# Altium schematic symbol library PMP23468.SchLib: 24 symbols
Pins are listed as number, name and electrical type; pins without a type are passive.

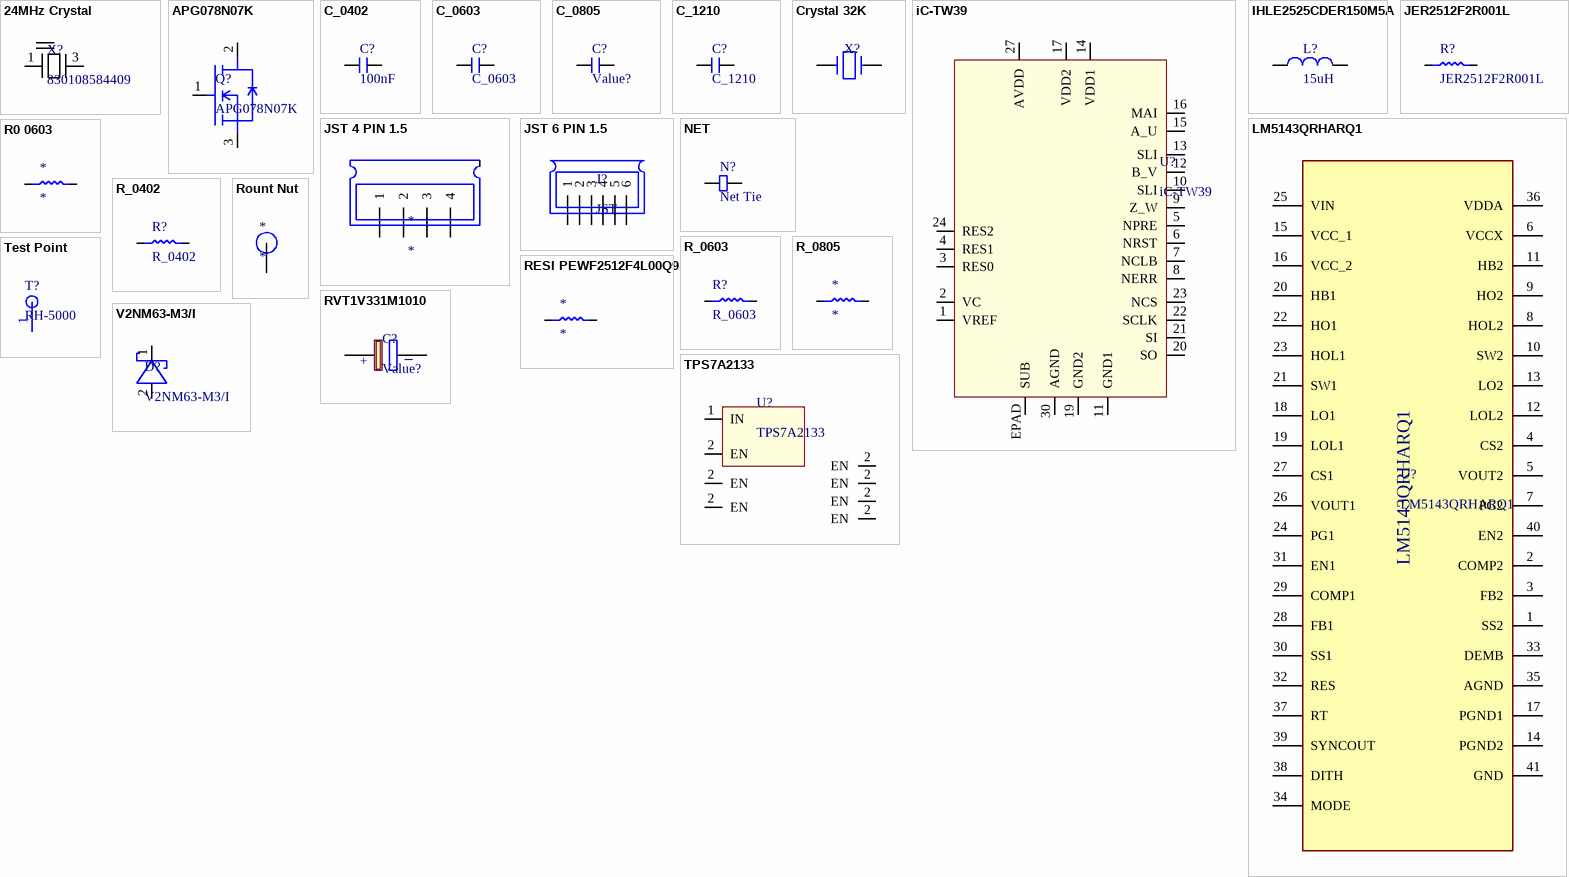
[diagram p0: symbols 24MHz Crystal to V2NM63-M3/I]

## 24MHz Crystal
designator X?, comment 830108584409
footprint 24MHz Crystal
pins: 1, 2, 3, 4

## APG078N07K
designator Q?
70V 80A 6.7mΩ@10V,30A 45W 3V@250uA 1PCSNChannel TO-252-2  MOSFETs ROHS; Manufacturer Part No: APG078N07K; JLCPCB Part No: C2995332
footprint APG078N07K (70V 80A 6.7mO@10V,30A 45W 3V@250uA 1PCSNChannel TO-252-2  MOSFETs ROHS)
pins: 1 G, 2 D, 3 S

## C_0402
designator C?, comment 100nF
footprint C_0402
pins: 1, 2

## C_0603
designator C?
footprint C_0603
pins: 1, 2

## C_0805
designator C?, comment Value?
Manufacturer Part No: *; JLCPCB Part No: *
footprint C_0805
pins: 1, 2

## C_1210
designator C?
footprint C_1210
pins: 1, 2

## Crystal 32K
designator X?
footprint Crystal 32k
pins: 1, 2

## iC-TW39
designator U?
footprint iC-TW39 (24-BIT MAGNETIC ON-AXIS ANGLE SENSOR)
pins: 1 VREF, 2 VC, 3 RES0, 4 RES1, 5 NPRE, 6 NRST, 7 NCLB, 8 NERR, 9 Z_W, 10 SLI, 11 GND1, 12 B_V, 13 SLI, 14 VDD1, 15 A_U, 16 MAI, 17 VDD2, 19 GND2, 20 SO, 21 SI, 22 SCLK, 23 NCS, 24 RES2, 27 AVDD, 30 AGND, EPAD SUB

## IHLE2525CDER150M5A
designator L?, comment 15uH
pins: 1, 2

## JER2512F2R001L
designator R?
RES 1mΩ ±1% 2W 2512; Manufacturer Part No: JIERR JER2512F2R001L; LCSC Part No: C49164682
footprint JER2512F2R001L
pins: 1, 2

## JST 4 PIN 1.5
designator *
footprint JST 4 PIN 1.5
pins: 1, 2, 3, 4

## JST 6 PIN 1.5
designator J?, comment JST
footprint JST 6 PIN 1.5
pins: 1, 2, 3, 4, 5, 6

## LM5143QRHARQ1
designator U?
JLCPCB Part No: C5219258; Manufacturer Part No: LM5143QRHARQ1
footprint LM5143QRHARQ1 (40A 600mV~55V 3.5V~65V VQFN(RHA)-40  DC-DC Converters ROHS)
pins: 1 SS2, 2 COMP2, 3 FB2, 4 CS2, 5 VOUT2, 6 VCCX, 7 PG2, 8 HOL2, 9 HO2, 10 SW2, 11 HB2, 12 LOL2, 13 LO2, 14 PGND2, 15 VCC_1, 16 VCC_2, 17 PGND1, 18 LO1, 19 LOL1, 20 HB1, 21 SW1, 22 HO1, 23 HOL1, 24 PG1, 25 VIN, 26 VOUT1, 27 CS1, 28 FB1, 29 COMP1, 30 SS1, 31 EN1, 32 RES, 33 DEMB, 34 MODE, 35 AGND, 36 VDDA, 37 RT, 38 DITH, 39 SYNCOUT, 40 EN2, 41 GND

## NET
designator N?, comment Net Tie  (net tie)
footprint Net
pins: 1, 2

## R0 0603
designator *
footprint R0 0603
pins: 1, 2

## R_0402
designator R?
footprint R_0402
pins: 1, 2

## R_0603
designator R?
footprint R_0603 (SMD Resistor 0603)
pins: 1, 2

## R_0805
designator *
footprint R_0805
pins: 1, 2

## RESI PEWF2512F4L00Q9
designator *
footprint RESI PEWF2512F4L00Q9 (3W 4mΩ Surface Mount Shunt ±50ppm/℃ ±1% 2512 Current Sense Resistors / Shunt Resistors ROHS)
pins: 1, 2

## Rount Nut
designator *
footprint Round Nut
pins: 1

## RVT1V331M1010
designator C?, comment Value?
Manufacturer Part No: *; JLCPCB Part No: *
footprint RVT1V331M1010
pins: 1, 2
text: _; +

## Test Point
designator T?, comment RH-5000
Manufacturer Part No: RH-5000; JLCPCB Part No: C5277086
footprint Test Point (RH-5000)
pins: 1

## TPS7A2133
designator U?
pins: 1 IN, 2 EN, 2 EN, 2 EN, 2 EN, 2 EN, 2 EN, 2 EN

## V2NM63-M3/I
designator D?
footprint V2NM63-M3/I
pins: 1, 2